# EAGLE library part 43045-0612 (library 43045-0612)
Micro-Fit 3.0 Vertical Header, 3.00mm Pitch, Dual Row, 6 Circuits, with PCB Polarizing Peg, Glow-Wire Capable Source: Datasheet <https://www.molex.com/pdm_docs/sd/430450612_sd.pdf>
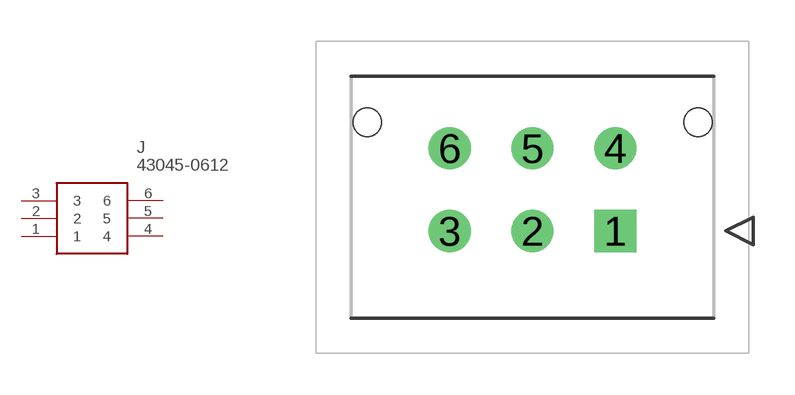
[diagram p0: symbol with the pads of 43045-06YY_121314; footprint 43045-06YY_121314]

Designator prefix J

## 43045-0612 (Description: Micro-Fit 3.0 Vertical Header, 3.00mm Pitch, Dual Row, 6 Circuits, with PCB Polarizing Peg, Glow-Wire Capable; Height: 9.91mm; Manufacturer_Name: Molex; Manufacturer_Part_Number: 43045-0612; Mouser_Part_Number: 538-43045-0612; Mouser_Price-Stock: https://www.mouser.co.uk/ProductDetail/Molex/43045-0612?qs=KC2ywxza1kqWo9LLJ5Lh3w%3D%3D)  [43045-06YY_121314]
1  1
2  2
3  3
4  4
5  5
6  6

## Footprint 43045-06YY_121314 (pad centres in mm)
43045-06YY_121314
drill 1.02 pad 1.52 square: 1 0,0
drill 1.02 pad 1.52: 2 -3,0; 3 -6,0; 4 0,3; 5 -3,3; 6 -6,3
hole 1.02 at 3,3.94
hole 1.02 at -9,3.94